# Altium footprint library PESD2CAN,215.PcbLib: 3 footprints
Each footprint in its own frame and in the unit in brackets; x right, y up, seen from the top. Pads: shape width x height; smd on the part's side, far side on the other; paste and mask are expansions set on the pad; w line width, h text height; cw(c..) or ccw(c..) is an arc to the next point about the centre after c.
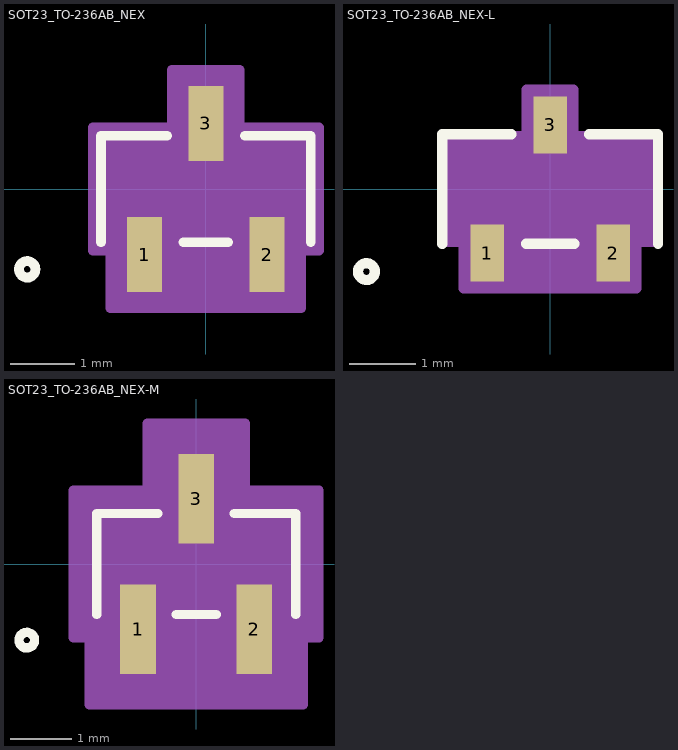
[diagram p0: the footprints below, top view; thin cyan lines are the x and y axes]

## SOT23_TO-236AB_NEX [mil]
pads (3):
  rect 21.36x45.56 smd paste+0 mask+0: 1(-37.4,-40) 2(37.4,-40) 3(0,40)
Top Overlay:
  circle w6: c-109,-49 r5
  lines w6: -64,-32.5 -64,32.5 -23.78,32.5 ; -13.62,-32.5 13.62,-32.5 ; 23.78,32.5 64,32.5 64,-32.5
  text ".Designator" at -137.5,-25 h50
Mechanical 13:
  circle w1: c-49,-17.5 r5
  lines w1: -59,-27.5 59,-27.5 59,27.5 -59,27.5 -59,-27.5 ; -46.9,-49 -46.9,-27.5 -27.9,-27.5 -27.9,-49 -46.9,-49 ; -9.5,27.5 9.5,27.5 9.5,49 -9.5,49 -9.5,27.5 ; 27.9,-49 27.9,-27.5 46.9,-27.5 46.9,-49 27.9,-49
  text ".Designator" at -137.5,-25 h50
Mechanical 15:
  region: -69,-37.5 -69,37.5 -20.68,37.5 -20.68,72.78 20.68,72.78 20.68,37.5 69,37.5 69,-37.5 58.08,-37.5 58.08,-72.78 -58.08,-72.78 -58.08,-37.5
  region: 59,-27.5 -59,-27.5 -59,27.5 59,27.5
  lines w6: -69,-37.5 -69,37.5 -20.68,37.5 -20.68,72.78 20.68,72.78 20.68,37.5 69,37.5 69,-37.5 58.08,-37.5 58.08,-72.78 -58.08,-72.78 -58.08,-37.5 -69,-37.5
3D body "SOT23_TO-236AB_NEX.step": height 43.11, standoff 0, extent -59.02,-49.02 59.02,49.02

## SOT23_TO-236AB_NEX-L [mm]
pads (3):
  rect 0.503x0.857 smd paste+0 mask+0: 1(-0.95,-0.966) 2(0.95,-0.966) 3(0,0.966)
Top Overlay:
  circle w0.152: c-2.769,-1.245 r0.127
  lines w0.152: -1.626,-0.826 -1.626,0.826 -0.584,0.826 ; -0.366,-0.826 0.366,-0.826 ; 0.584,0.826 1.626,0.826 1.626,-0.826
  text ".Designator" at -3.492,-0.635 h1.27
Mechanical 13:
  circle w0.025: c-1.245,-0.445 r0.127
  lines w0.025: -1.499,-0.699 1.499,-0.699 1.499,0.699 -1.499,0.699 -1.499,-0.699 ; -1.191,-1.245 -1.191,-0.699 -0.709,-0.699 -0.709,-1.245 -1.191,-1.245 ; -0.241,0.699 0.241,0.699 0.241,1.245 -0.241,1.245 -0.241,0.699 ; 0.709,-1.245 0.709,-0.699 1.191,-0.699 1.191,-1.245 0.709,-1.245
  text ".Designator" at -3.492,-0.635 h1.27
Mechanical 15:
  region: -1.6,-0.8 -1.6,0.8 -0.353,0.8 -0.353,1.496 0.353,1.496 0.353,0.8 1.6,0.8 1.6,-0.8 1.303,-0.8 1.303,-1.496 -1.303,-1.496 -1.303,-0.8
  region: 1.499,-0.699 -1.499,-0.699 -1.499,0.699 1.499,0.699
  lines w0.152: -1.6,-0.8 -1.6,0.8 -0.353,0.8 -0.353,1.496 0.353,1.496 0.353,0.8 1.6,0.8 1.6,-0.8 1.303,-0.8 1.303,-1.496 -1.303,-1.496 -1.303,-0.8 -1.6,-0.8
3D body "SOT23_TO-236AB_NEX.step": height 1.09, standoff 0, extent -1.499,-1.245 1.499,1.245

## SOT23_TO-236AB_NEX-M [mm]
pads (3):
  rect 0.583x1.457 smd paste+0 mask+0: 1(-0.95,-1.066) 2(0.95,-1.066) 3(0,1.066)
Top Overlay:
  circle w0.152: c-2.769,-1.245 r0.127
  lines w0.152: -1.626,-0.826 -1.626,0.826 -0.624,0.826 ; -0.326,-0.826 0.326,-0.826 ; 0.624,0.826 1.626,0.826 1.626,-0.826
  text ".Designator" at -3.492,-0.635 h1.27
Mechanical 13:
  circle w0.025: c-1.245,-0.445 r0.127
  lines w0.025: -1.499,-0.699 1.499,-0.699 1.499,0.699 -1.499,0.699 -1.499,-0.699 ; -1.191,-1.245 -1.191,-0.699 -0.709,-0.699 -0.709,-1.245 -1.191,-1.245 ; -0.241,0.699 0.241,0.699 0.241,1.245 -0.241,1.245 -0.241,0.699 ; 0.709,-1.245 0.709,-0.699 1.191,-0.699 1.191,-1.245 0.709,-1.245
  text ".Designator" at -3.492,-0.635 h1.27
Mechanical 15:
  region: -2.007,-1.206 -2.007,1.206 -0.799,1.206 -0.799,2.303 0.799,2.303 0.799,1.206 2.007,1.206 2.007,-1.206 1.749,-1.206 1.749,-2.303 -1.749,-2.303 -1.749,-1.206
  region: 1.499,-0.699 -1.499,-0.699 -1.499,0.699 1.499,0.699
  lines w0.152: -2.007,-1.206 -2.007,1.206 -0.799,1.206 -0.799,2.303 0.799,2.303 0.799,1.206 2.007,1.206 2.007,-1.206 1.749,-1.206 1.749,-2.303 -1.749,-2.303 -1.749,-1.206 -2.007,-1.206
3D body "SOT23_TO-236AB_NEX.step": height 1.09, standoff 0, extent -1.499,-1.245 1.499,1.245